# Altium schematic symbol library 8.0 - 蜂鸣器.SCHLIB: 1 symbol
Pins are listed as number, name and electrical type; pins without a type are passive.

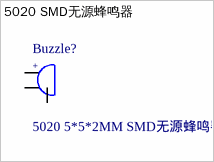
[diagram p0: symbol 5020 SMD无源蜂鸣器]

## 5020 SMD无源蜂鸣器
designator Buzzle?, comment 5020 5*5*2MM SMD无源蜂鸣器
5020 5*5*2MM SMD贴片超薄超小电磁式无源蜂鸣器
footprint 5020 5*5*2MM SMD贴片超薄超小电磁式无源蜂鸣器
pins: 1, 2, 3
text: +